# Altium schematic symbol library TPD1E10B06DYAR.SchLib: 1 symbol
Pins are listed as number, name and electrical type; pins without a type are passive.

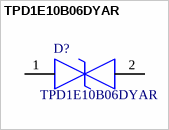
[diagram p0: symbol TPD1E10B06DYAR]

## TPD1E10B06DYAR
designator D?
ESD Suppressors / TVS Diodes 12-pF, +/-5.5V, +/-30-kV ESD protection diode in 0402 and SOD-523 package; Manufacturer_Name: Texas Instruments; Geometry.Height: 0.77mm; Manufacturer_Part_Number: TPD1E10B06DYAR; Mouser Part Number: 595-TPD1E10B06DYAR; Mouser Price/Stock: https://www.mouser.co.uk/ProductDetail/Texas-Instruments/TPD1E10B06DYAR?qs=Rp5uXu7WBW9%2F66n97S3Kgw%3D%3D; Arrow Part Number: TPD1E10B06DYAR; Arrow Price/Stock: https://www.arrow.com/en/products/tpd1e10b06dyar/texas-instruments.html?utm_currency=USD&region=nac; Datasheet Link: https://www.ti.com/lit/ds/symlink/tpd1e10b06.pdf?ts=1676259025619&ref_url=https%253A%252F%252Fwww.ti.com%252Fproduct%252FTPD1E10B06%252Fpart-details%252FTPD1E10B06DYAR
footprint SODFL1608X77N
pins: 1, 2